# EAGLE library part SJ2-35984E-SMT-TR_SJ2-35984E-SMT-TR (library HA_FONA_LARA_20)
4 conductors, 3.5mm, SMT Audio Jack w/ 3 Switch
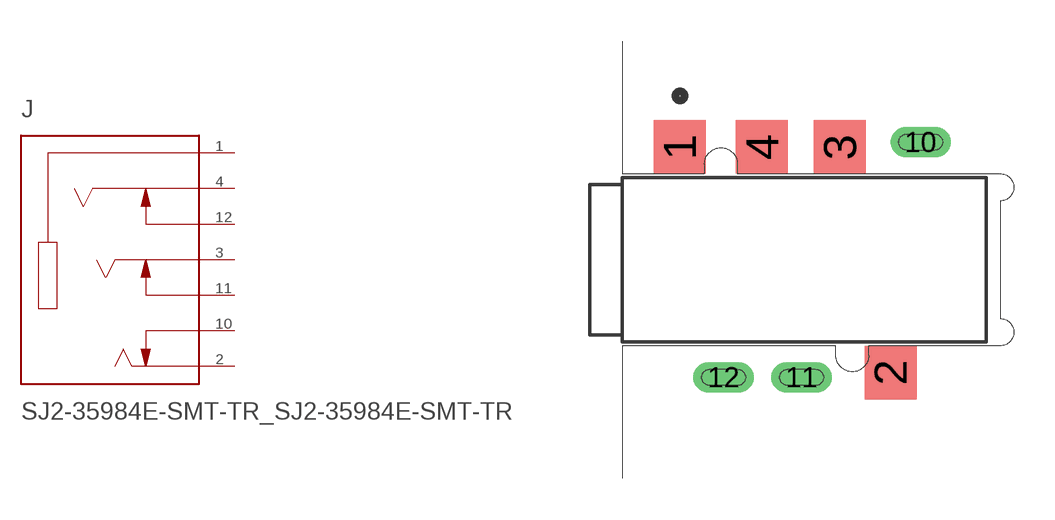
[diagram p6: symbol with the pads of SJ2-35984E-SMT-TR_CUI_SJ2-35984E-SMT-TR; footprint SJ2-35984E-SMT-TR_CUI_SJ2-35984E-SMT-TR]

Designator prefix J

## SJ2-35984E-SMT-TR_SJ2-35984E-SMT-TR (MANUFACTURER: CUI; STANDARD: Manufacturer recommendation)  [SJ2-35984E-SMT-TR_CUI_SJ2-35984E-SMT-TR]
1  SLEEVE  pas
2  TIP  pas
3  RING1  pas
4  RING2  pas
10  TIP_SWITCH  pas
11  RING1_SWITCH  pas
12  RING2_SWITCH  pas

## Footprint SJ2-35984E-SMT-TR_CUI_SJ2-35984E-SMT-TR (pad centres in mm)
smd 1.9 x 1.95: 1 -4.55,4.125; 2 3.15,-4.125; 3 1.3,4.125; 4 -1.55,4.125
drill 0.6 long: 10 4.25,4.3; 11 -0.1,-4.3; 12 -2.95,-4.3